# Altium schematic symbol library 2019-09-14_13-18-58.SchLib: 2 symbols
Pins are listed as number, name and electrical type; pins without a type are passive.

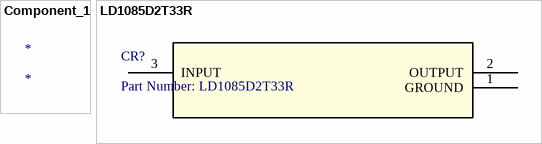
[diagram p0: symbols Component_1 to LD1085D2T33R]

## Component_1
designator *

## LD1085D2T33R
designator CR?, comment Part Number: LD1085D2T33R
No Description Available; Vendor: STMicroelectronics; Built_By: EMA_UL_Team; Type: DEV; Manufacturer_Part_Number: LD1085D2T33R; Copyright: Copyright (C) 2018 Accelerated Designs. All rights reserved; RefDes: RefDes; Value: Value
footprint D2PAK
pins: 1 GROUND, 2 OUTPUT, 3 INPUT